# Altium footprint library CONNFLY_DS1040_01RT.PcbLib: 1 footprints
Each footprint in its own frame and in the unit in brackets; x right, y up, seen from the top. Pads: shape width x height; smd on the part's side, far side on the other; paste and mask are expansions set on the pad; w line width, h text height; cw(c..) or ccw(c..) is an arc to the next point about the centre after c.
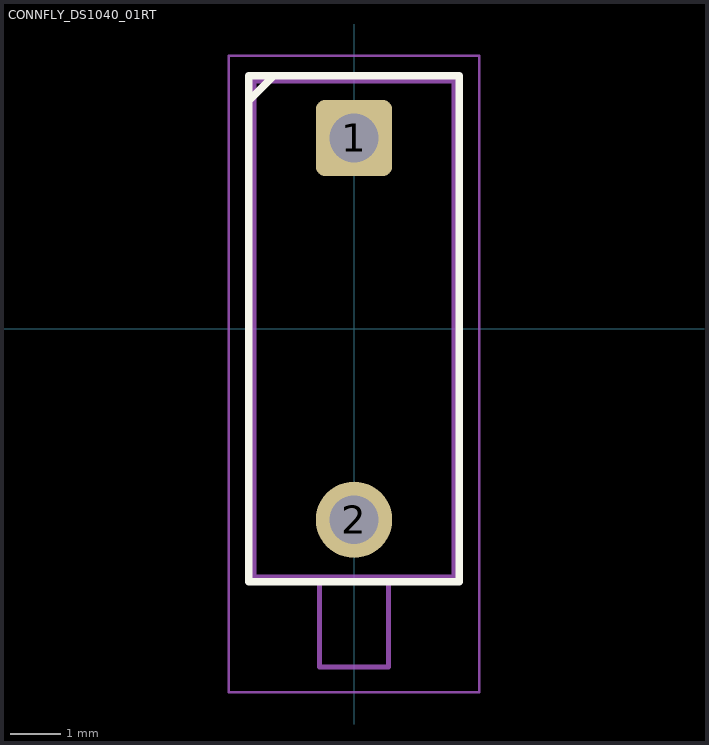
[diagram p0: the footprint, top view; thin cyan lines are the x and y axes]

## CONNFLY_DS1040_01RT [mil] "Connfly DS1040-01RT piano SPST; pitch7.62mm PTH0.97mm pad1.524mm; EasyEDA STEP approximate height8.8 vs drawing8.0mm"
height 346.46
pads (2):
  rrect25% 60x60 hole 38.19 paste+0 mask+1.97: 1(0,150)
  round 60 hole 38.19 paste+0 mask+1.97: 2(0,-150)
Top Overlay:
  lines w5.91: -82.68,179.13 -62.99,198.82 ; -82.68,-198.82 82.68,-198.82 82.68,198.82 -82.68,198.82 -82.68,-198.82
Mechanical 1:
  lines w3.94: -78.74,-194.88 78.74,-194.88 78.74,194.88 -78.74,194.88 -78.74,-194.88 ; -26.97,-265.75 26.97,-265.75 26.97,-194.88 -26.97,-194.88 -26.97,-265.75
Mechanical 15:
  lines w1.97: -98.43,-285.43 98.43,-285.43 98.43,214.57 -98.43,214.57 -98.43,-285.43
3D body "DS1040-01RT_EasyEDA.step": height 346.46, standoff 0, extent -78.74,-253.94 78.74,194.88